# Altium schematic symbol library Schematics_power.SchLib: 31 symbols
Pins are listed as number, name and electrical type; pins without a type are passive.

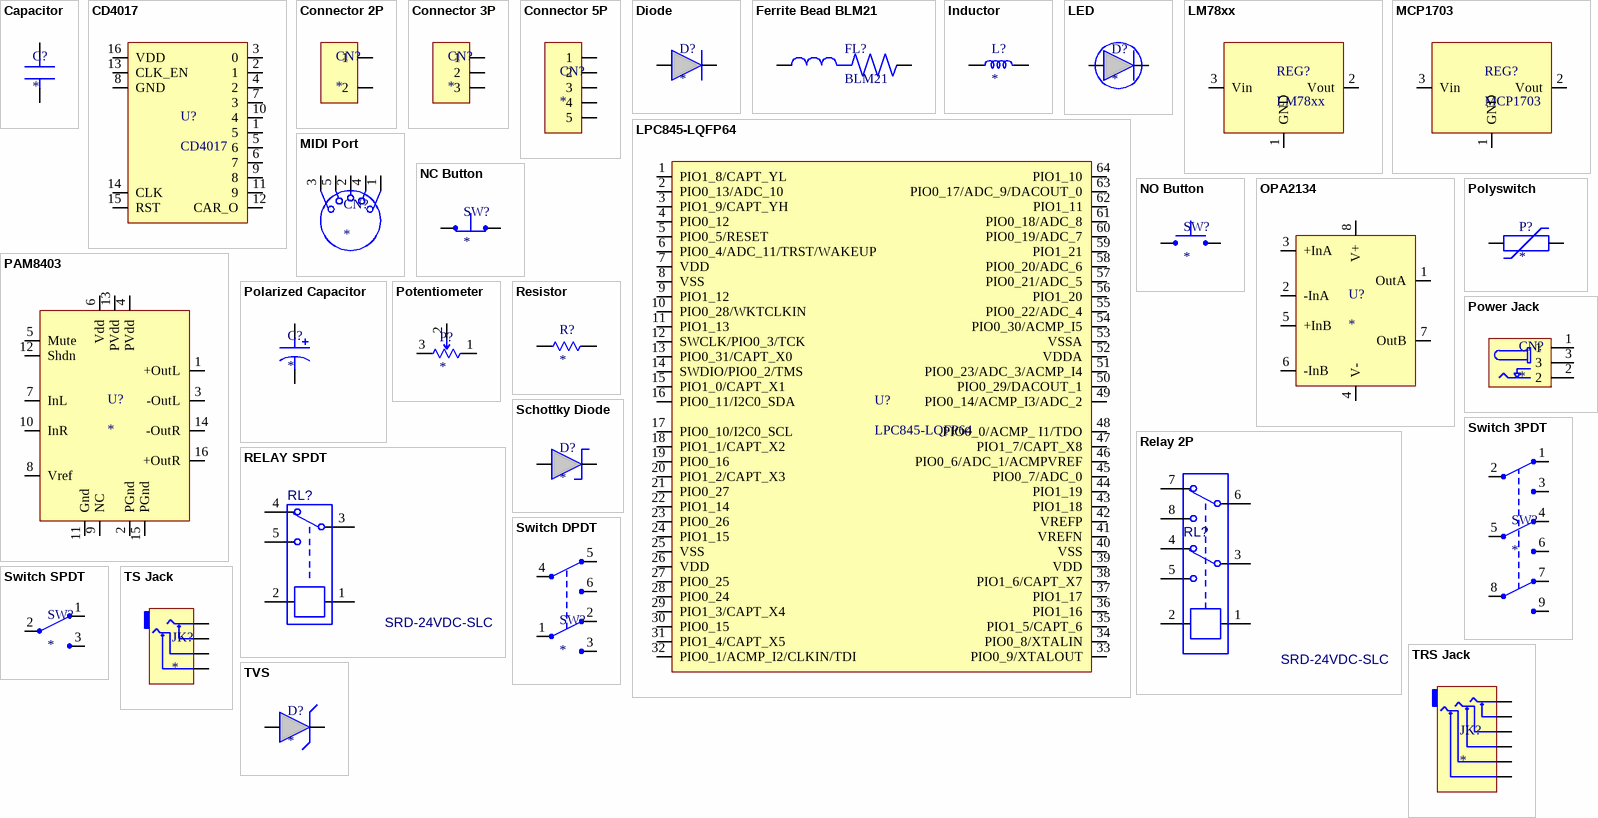
[diagram p0: symbols Capacitor to TVS]

## Capacitor
designator C?
Non polarized capacitor
pins: 1, 2

## CD4017
designator U?
Decade counter or divider
pins: 1 5, 2 1, 3 0, 4 2, 5 6, 6 7, 7 3, 8 GND, 9 8, 10 4, 11 9, 12 CAR_O, 13 CLK_EN, 14 CLK, 15 RST, 16 VDD

## Connector 2P
designator CN?
2 pins connector
pins: 1, 2

## Connector 3P
designator CN?
3 pins connector
pins: 1, 2, 3

## Connector 5P
designator CN?
5 pins connector
pins: 1, 2, 3, 4, 5

## Diode
designator D?
Diode
pins: 1, 2

## Ferrite Bead BLM21
designator FL?, comment BLM21
Ferrite Bead; MF: Murata; MP: BLM21BB151SZ1D; Package: 2012 Murata; Value: *; Price: None; Availability: Unavailable; SnapEDA_Link: https://www.snapeda.com/parts/BLM21BB151SZ1D/Murata/view-part/2734275/?ref=snap
footprint BEADC2012X105N
pins: 1, 2

## Inductor
designator L?
Inductor
pins: 2, 3

## LED
designator D?
LED
pins: 1, 2

## LM78xx
designator REG?
Voltage regulator
pins: 1 GND, 2 Vout, 3 Vin

## LPC845-LQFP64
designator U?
LPC845 microcontroller
pins: 1 PIO1_8/CAPT_YL, 2 PIO0_13/ADC_10, 3 PIO1_9/CAPT_YH, 4 PIO0_12, 5 PIO0_5/RESET, 6 PIO0_4/ADC_11/TRST/WAKEUP, 7 VDD, 8 VSS, 9 PIO1_12, 10 PIO0_28/WKTCLKIN, 11 PIO1_13, 12 SWCLK/PIO0_3/TCK, 13 PIO0_31/CAPT_X0, 14 SWDIO/PIO0_2/TMS, 15 PIO1_0/CAPT_X1, 16 PIO0_11/I2C0_SDA, 17 PIO0_10/I2C0_SCL, 18 PIO1_1/CAPT_X2, 19 PIO0_16 , 20 PIO1_2/CAPT_X3 , 21 PIO0_27 , 22 PIO1_14, 23 PIO0_26, 24 PIO1_15, 25 VSS , 26 VDD, 27 PIO0_25, 28 PIO0_24, 29 PIO1_3/CAPT_X4, 30 PIO0_15, 31 PIO1_4/CAPT_X5, 32 PIO0_1/ACMP_I2/CLKIN/TDI, 33 PIO0_9/XTALOUT, 34 PIO0_8/XTALIN, 35 PIO1_5/CAPT_6, 36 PIO1_16, 37 PIO1_17, 38 PIO1_6/CAPT_X7, 39 VDD, 40 VSS, 41 VREFN, 42 VREFP, 43 PIO1_18, 44 PIO1_19, 45 PIO0_7/ADC_0, 46 PIO0_6/ADC_1/ACMPVREF, 47 PIO1_7/CAPT_X8, 48 PIO0_0/ACMP_ I1/TDO, 49 PIO0_14/ACMP_I3/ADC_2, 50 PIO0_29/DACOUT_1, 51 PIO0_23/ADC_3/ACMP_I4, 52 VDDA, 53 VSSA, 54 PIO0_30/ACMP_I5, 55 PIO0_22/ADC_4, 56 PIO1_20, 57 PIO0_21/ADC_5, 58 PIO0_20/ADC_6, 59 PIO1_21, 60 PIO0_19/ADC_7, 61 PIO0_18/ADC_8, 62 PIO1_11, 63 PIO0_17/ADC_9/DACOUT_0, 64 PIO1_10

## MCP1703
designator REG?
Voltage regulator
pins: 1 GND, 2 Vout, 3 Vin

## MIDI Port
designator CN?
MIDI port
pins: 1, 2, 3, 4, 5

## NC Button
designator SW?
Normally closed push button
pins: 2, 3

## NO Button
designator SW?
Normally open push button
pins: 2, 3

## OPA2134
designator U?
Audio operational amplifier
pins: 1 OutA, 2 -InA, 3 +InA, 4 V-, 5 +InB, 6 -InB, 7 OutB, 8 V+

## PAM8403
designator U?
3W class-D audio amplifier
pins: 1 +OutL, 2 PGnd, 3 -OutL, 4 PVdd, 5 Mute, 6 Vdd, 7 InL, 8 Vref, 9 NC, 10 InR, 11 Gnd, 12 Shdn, 13 PVdd, 14 -OutR, 15 PGnd, 16 +OutR

## Polarized Capacitor
designator C?
Polarized capacitor
pins: 1, 2

## Polyswitch
designator P?
Polyswitch
pins: 1, 2

## Potentiometer
designator P?
Potentiometer
pins: 1, 2, 3

## Power Jack
designator CN?
3 pins jack
pins: 1 (power), 2 (power), 3 (power)

## Relay 2P
designator RL?, comment SRD-24VDC-SLC
Relay SPDT
pins: 1, 2, 3, 4, 5, 6, 7, 8

## RELAY SPDT
designator RL?, comment SRD-24VDC-SLC
Relay SPDT
pins: 1, 2, 3, 4, 5

## Resistor
designator R?
Resistor
pins: 1, 2

## Schottky Diode
designator D?
Schottky diode
pins: 1, 2

## Switch 3PDT
designator SW?
Normally open switch with 2 points
pins: 1, 2, 3, 4, 5, 6, 7, 8, 9

## Switch DPDT
designator SW?
Normally open switch with 2 points
pins: 1, 2, 3, 4, 5, 6

## Switch SPDT
designator SW?
Normally open switch with 2 points
pins: 1, 2, 3

## TRS Jack
designator JK?
Stereo audio jack
pins: 1 (power), 2, 3 (power), 4 (power), 5 (power), 6 (power)

## TS Jack
designator JK?
Mono audio jack
pins: 1 (power), 2 (power), 3 (power), 4 (power)

## TVS
designator D?
Transient voltage suppression diode
pins: 1, 2